# Altium footprint library LTC5594IUHPBF.PcbLib: 3 footprints
Each footprint in its own frame and in the unit in brackets; x right, y up, seen from the top. Pads: shape width x height; smd on the part's side, far side on the other; paste and mask are expansions set on the pad; w line width, h text height; cw(c..) or ccw(c..) is an arc to the next point about the centre after c.
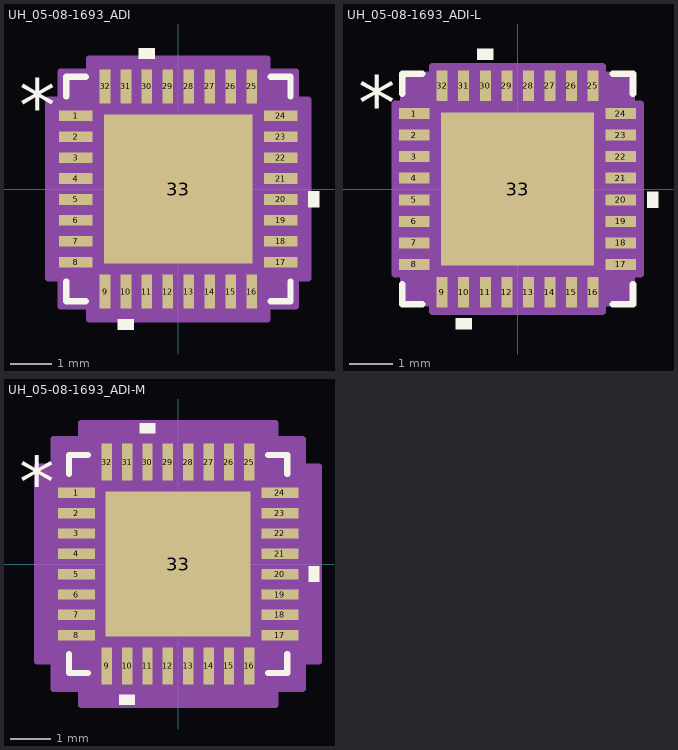
[diagram p0: the footprints below, top view; thin cyan lines are the x and y axes]

## UH_05-08-1693_ADI [mil]
pads (33):
  rect 31.81x10.03 smd paste+0 mask+0: 1(-96.41,68.92) 2(-96.41,49.23) 3(-96.41,29.54) 4(-96.41,9.85) 5(-96.41,-9.85) 6(-96.41,-29.54) 7(-96.41,-49.23) 8(-96.41,-68.92) 17(96.41,-68.92) 18(96.41,-49.23) 19(96.41,-29.54) 20(96.41,-9.85) 21(96.41,9.85) 22(96.41,29.54) 23(96.41,49.23) 24(96.41,68.92)
  rect 10.03x31.81 smd paste+0 mask+0: 9(-68.92,-96.41) 10(-49.23,-96.41) 11(-29.54,-96.41) 12(-9.85,-96.41) 13(9.85,-96.41) 14(29.54,-96.41) 15(49.23,-96.41) 16(68.92,-96.41) 25(68.92,96.41) 26(49.23,96.41) 27(29.54,96.41) 28(9.85,96.41) 29(-9.85,96.41) 30(-29.54,96.41) 31(-49.23,96.41) 32(-68.92,96.41)
  rect 140x140 smd paste-70 mask+0: 33(0,0)
Top Overlay:
  region: -22.04,122.31 -37.03,122.31 -37.03,132.31 -22.04,132.31
  region: 122.31,-2.35 132.31,-2.35 132.31,-17.34 122.31,-17.34
  region: -41.73,-122.31 -56.73,-122.31 -56.73,-132.31 -41.73,-132.31
  lines w6: -105.5,-87.03 -105.5,-105.5 -87.03,-105.5 ; -105.5,87.03 -105.5,105.5 -87.03,105.5 ; 87.03,-105.5 105.5,-105.5 105.5,-87.03 ; 87.03,105.5 105.5,105.5 105.5,87.03
  text ".Designator" at -137.5,-25 h50
  text "*" at -149.81,53.76 h50
Top Paste:
  region: 66.06,-3.94 3.94,-3.94 3.94,-66.06 66.06,-66.06
  region: 66.06,66.06 3.94,66.06 3.94,3.94 66.06,3.94
  region: -3.94,-3.94 -66.06,-3.94 -66.06,-66.06 -3.94,-66.06
  region: -3.94,66.06 -66.06,66.06 -66.06,3.94 -3.94,3.94
Mechanical 13:
  lines w1: -100.5,50.5 -50.5,100.5 ; -100.5,-100.5 -100.5,100.5 100.5,100.5 100.5,-100.5 -100.5,-100.5 ; -100.5,-74.92 -100.5,-62.91 -100.5,-74.92 ; -100.5,-55.23 -100.5,-43.23 -100.5,-55.23 ; -100.5,-35.53 -100.5,-23.54 -100.5,-35.53 ; -100.5,-15.85 -100.5,-3.85 -100.5,-15.85 ; -100.5,3.85 -100.5,15.85 -100.5,3.85 ; -100.5,23.54 -100.5,35.53 -100.5,23.54 ; -100.5,43.23 -100.5,55.23 -100.5,43.23 ; -100.5,62.91 -100.5,74.92 -100.5,62.91 ; -74.92,-100.5 -62.91,-100.5 -74.92,-100.5 ; -74.92,100.5 -62.91,100.5 -74.92,100.5 ; -55.23,-100.5 -43.23,-100.5 -55.23,-100.5 ; -55.23,100.5 -43.23,100.5 -55.23,100.5 ; -35.53,-100.5 -23.54,-100.5 -35.53,-100.5 ; -35.53,100.5 -23.54,100.5 -35.53,100.5 ; -15.85,-100.5 -3.85,-100.5 -15.85,-100.5 ; -15.85,100.5 -3.85,100.5 -15.85,100.5 ; 3.85,-100.5 15.85,-100.5 3.85,-100.5 ; 3.85,100.5 15.85,100.5 3.85,100.5 ; 23.54,-100.5 35.53,-100.5 23.54,-100.5 ; 23.54,100.5 35.53,100.5 23.54,100.5 ; 43.23,-100.5 55.23,-100.5 43.23,-100.5 ; 43.23,100.5 55.23,100.5 43.23,100.5 ; 62.91,-100.5 74.92,-100.5 62.91,-100.5 ; 62.91,100.5 74.92,100.5 62.91,100.5 ; 100.5,-74.92 100.5,-62.91 100.5,-74.92 ; 100.5,-55.23 100.5,-43.23 100.5,-55.23 ; 100.5,-35.53 100.5,-23.54 100.5,-35.53 ; 100.5,-15.85 100.5,-3.85 100.5,-15.85 ; 100.5,3.85 100.5,15.85 100.5,3.85 ; 100.5,23.54 100.5,35.53 100.5,23.54 ; 100.5,43.23 100.5,55.23 100.5,43.23 ; 100.5,62.91 100.5,74.92 100.5,62.91
  text "*" at -93,53.76 h50
  text ".Designator" at -137.5,-25 h50
Mechanical 15:
  region: -83.93,-110.5 -110.5,-110.5 -110.5,-83.93 -122.31,-83.93 -122.31,83.93 -110.5,83.93 -110.5,110.5 -83.93,110.5 -83.93,122.31 83.93,122.31 83.93,110.5 110.5,110.5 110.5,83.93 122.31,83.93 122.31,-83.93 110.5,-83.93 110.5,-110.5 83.93,-110.5 83.93,-122.31 -83.93,-122.31
  lines w6: -122.31,-83.93 -122.31,83.93 -110.5,83.93 -110.5,110.5 -83.93,110.5 -83.93,122.31 83.93,122.31 83.93,110.5 110.5,110.5 110.5,83.93 122.31,83.93 122.31,-83.93 110.5,-83.93 110.5,-110.5 83.93,-110.5 83.93,-122.31 -83.93,-122.31 -83.93,-110.5 -110.5,-110.5 -110.5,-83.93 -122.31,-83.93
3D body "UH_05-08-1693_ADI.step": height 32.09, standoff 0, extent -100.51,-100.51 100.51,100.51

## UH_05-08-1693_ADI-L [mil]
pads (33):
  rect 27.87x10.03 smd paste+0 mask+0: 1(-94.44,68.92) 2(-94.44,49.23) 3(-94.44,29.54) 4(-94.44,9.85) 5(-94.44,-9.85) 6(-94.44,-29.54) 7(-94.44,-49.23) 8(-94.44,-68.92) 17(94.44,-68.92) 18(94.44,-49.23) 19(94.44,-29.54) 20(94.44,-9.85) 21(94.44,9.85) 22(94.44,29.54) 23(94.44,49.23) 24(94.44,68.92)
  rect 10.03x27.87 smd paste+0 mask+0: 9(-68.92,-94.44) 10(-49.23,-94.44) 11(-29.54,-94.44) 12(-9.85,-94.44) 13(9.85,-94.44) 14(29.54,-94.44) 15(49.23,-94.44) 16(68.92,-94.44) 25(68.92,94.44) 26(49.23,94.44) 27(29.54,94.44) 28(9.85,94.44) 29(-9.85,94.44) 30(-29.54,94.44) 31(-49.23,94.44) 32(-68.92,94.44)
  rect 140x140 smd paste-70 mask+0: 33(0,0)
Top Overlay:
  region: -22.04,118.37 -37.03,118.37 -37.03,128.37 -22.04,128.37
  region: 118.37,-2.35 128.37,-2.35 128.37,-17.34 118.37,-17.34
  region: -41.73,-118.37 -56.73,-118.37 -56.73,-128.37 -41.73,-128.37
  lines w6: -105.5,-87.03 -105.5,-105.5 -87.03,-105.5 ; -105.5,87.03 -105.5,105.5 -87.03,105.5 ; 87.03,-105.5 105.5,-105.5 105.5,-87.03 ; 87.03,105.5 105.5,105.5 105.5,87.03
  text ".Designator" at -137.5,-25 h50
  text "*" at -145.87,53.76 h50
Top Paste:
  region: 66.06,-3.94 3.94,-3.94 3.94,-66.06 66.06,-66.06
  region: 66.06,66.06 3.94,66.06 3.94,3.94 66.06,3.94
  region: -3.94,-3.94 -66.06,-3.94 -66.06,-66.06 -3.94,-66.06
  region: -3.94,66.06 -66.06,66.06 -66.06,3.94 -3.94,3.94
Mechanical 13:
  lines w1: -100.5,50.5 -50.5,100.5 ; -100.5,-100.5 -100.5,100.5 100.5,100.5 100.5,-100.5 -100.5,-100.5 ; -100.5,-74.92 -100.5,-62.91 -100.5,-74.92 ; -100.5,-55.23 -100.5,-43.23 -100.5,-55.23 ; -100.5,-35.53 -100.5,-23.54 -100.5,-35.53 ; -100.5,-15.85 -100.5,-3.85 -100.5,-15.85 ; -100.5,3.85 -100.5,15.85 -100.5,3.85 ; -100.5,23.54 -100.5,35.53 -100.5,23.54 ; -100.5,43.23 -100.5,55.23 -100.5,43.23 ; -100.5,62.91 -100.5,74.92 -100.5,62.91 ; -74.92,-100.5 -62.91,-100.5 -74.92,-100.5 ; -74.92,100.5 -62.91,100.5 -74.92,100.5 ; -55.23,-100.5 -43.23,-100.5 -55.23,-100.5 ; -55.23,100.5 -43.23,100.5 -55.23,100.5 ; -35.53,-100.5 -23.54,-100.5 -35.53,-100.5 ; -35.53,100.5 -23.54,100.5 -35.53,100.5 ; -15.85,-100.5 -3.85,-100.5 -15.85,-100.5 ; -15.85,100.5 -3.85,100.5 -15.85,100.5 ; 3.85,-100.5 15.85,-100.5 3.85,-100.5 ; 3.85,100.5 15.85,100.5 3.85,100.5 ; 23.54,-100.5 35.53,-100.5 23.54,-100.5 ; 23.54,100.5 35.53,100.5 23.54,100.5 ; 43.23,-100.5 55.23,-100.5 43.23,-100.5 ; 43.23,100.5 55.23,100.5 43.23,100.5 ; 62.91,-100.5 74.92,-100.5 62.91,-100.5 ; 62.91,100.5 74.92,100.5 62.91,100.5 ; 100.5,-74.92 100.5,-62.91 100.5,-74.92 ; 100.5,-55.23 100.5,-43.23 100.5,-55.23 ; 100.5,-35.53 100.5,-23.54 100.5,-35.53 ; 100.5,-15.85 100.5,-3.85 100.5,-15.85 ; 100.5,3.85 100.5,15.85 100.5,3.85 ; 100.5,23.54 100.5,35.53 100.5,23.54 ; 100.5,43.23 100.5,55.23 100.5,43.23 ; 100.5,62.91 100.5,74.92 100.5,62.91
  text "*" at -93,53.76 h50
  text ".Designator" at -137.5,-25 h50
Mechanical 15:
  region: -77.93,-104.5 -104.5,-104.5 -104.5,-77.93 -112.37,-77.93 -112.37,77.93 -104.5,77.93 -104.5,104.5 -77.93,104.5 -77.93,112.37 77.93,112.37 77.93,104.5 104.5,104.5 104.5,77.93 112.37,77.93 112.37,-77.93 104.5,-77.93 104.5,-104.5 77.93,-104.5 77.93,-112.37 -77.93,-112.37
  lines w6: -112.37,-77.93 -112.37,77.93 -104.5,77.93 -104.5,104.5 -77.93,104.5 -77.93,112.37 77.93,112.37 77.93,104.5 104.5,104.5 104.5,77.93 112.37,77.93 112.37,-77.93 104.5,-77.93 104.5,-104.5 77.93,-104.5 77.93,-112.37 -77.93,-112.37 -77.93,-104.5 -104.5,-104.5 -104.5,-77.93 -112.37,-77.93
3D body "UH_05-08-1693_ADI.step": height 32.09, standoff 0, extent -100.51,-100.51 100.51,100.51

## UH_05-08-1693_ADI-M [mil]
pads (33):
  rect 35.75x10.03 smd paste+0 mask+0: 1(-98.37,68.92) 2(-98.37,49.23) 3(-98.37,29.54) 4(-98.37,9.85) 5(-98.37,-9.85) 6(-98.37,-29.54) 7(-98.37,-49.23) 8(-98.37,-68.92) 17(98.37,-68.92) 18(98.37,-49.23) 19(98.37,-29.54) 20(98.37,-9.85) 21(98.37,9.85) 22(98.37,29.54) 23(98.37,49.23) 24(98.37,68.92)
  rect 10.03x35.75 smd paste+0 mask+0: 9(-68.92,-98.37) 10(-49.23,-98.37) 11(-29.54,-98.37) 12(-9.85,-98.37) 13(9.85,-98.37) 14(29.54,-98.37) 15(49.23,-98.37) 16(68.92,-98.37) 25(68.92,98.37) 26(49.23,98.37) 27(29.54,98.37) 28(9.85,98.37) 29(-9.85,98.37) 30(-29.54,98.37) 31(-49.23,98.37) 32(-68.92,98.37)
  rect 140x140 smd paste-70 mask+0: 33(0,0)
Top Overlay:
  region: -41.73,-126.25 -56.73,-126.25 -56.73,-136.25 -41.73,-136.25
  region: 126.25,-2.35 136.25,-2.35 136.25,-17.34 126.25,-17.34
  region: -22.04,126.25 -37.03,126.25 -37.03,136.25 -22.04,136.25
  lines w6: -105.5,-87.03 -105.5,-105.5 -87.03,-105.5 ; -105.5,87.03 -105.5,105.5 -87.03,105.5 ; 87.03,-105.5 105.5,-105.5 105.5,-87.03 ; 87.03,105.5 105.5,105.5 105.5,87.03
  text "*" at -153.75,53.76 h50
  text ".Designator" at -137.5,-25 h50
Top Paste:
  region: -3.94,66.06 -66.06,66.06 -66.06,3.94 -3.94,3.94
  region: -3.94,-3.94 -66.06,-3.94 -66.06,-66.06 -3.94,-66.06
  region: 66.06,66.06 3.94,66.06 3.94,3.94 66.06,3.94
  region: 66.06,-3.94 3.94,-3.94 3.94,-66.06 66.06,-66.06
Mechanical 13:
  lines w1: -100.5,50.5 -50.5,100.5 ; -100.5,-100.5 100.5,-100.5 100.5,100.5 -100.5,100.5 -100.5,-100.5 ; -100.5,-74.92 -100.5,-62.91 -100.5,-74.92 ; -100.5,-55.23 -100.5,-43.23 -100.5,-55.23 ; -100.5,-35.53 -100.5,-23.54 -100.5,-35.53 ; -100.5,-15.85 -100.5,-3.85 -100.5,-15.85 ; -100.5,3.85 -100.5,15.85 -100.5,3.85 ; -100.5,23.54 -100.5,35.53 -100.5,23.54 ; -100.5,43.23 -100.5,55.23 -100.5,43.23 ; -100.5,62.91 -100.5,74.92 -100.5,62.91 ; -74.92,-100.5 -62.91,-100.5 -74.92,-100.5 ; -74.92,100.5 -62.91,100.5 -74.92,100.5 ; -55.23,-100.5 -43.23,-100.5 -55.23,-100.5 ; -55.23,100.5 -43.23,100.5 -55.23,100.5 ; -35.53,-100.5 -23.54,-100.5 -35.53,-100.5 ; -35.53,100.5 -23.54,100.5 -35.53,100.5 ; -15.85,-100.5 -3.85,-100.5 -15.85,-100.5 ; -15.85,100.5 -3.85,100.5 -15.85,100.5 ; 3.85,-100.5 15.85,-100.5 3.85,-100.5 ; 3.85,100.5 15.85,100.5 3.85,100.5 ; 23.54,-100.5 35.53,-100.5 23.54,-100.5 ; 23.54,100.5 35.53,100.5 23.54,100.5 ; 43.23,-100.5 55.23,-100.5 43.23,-100.5 ; 43.23,100.5 55.23,100.5 43.23,100.5 ; 62.91,-100.5 74.92,-100.5 62.91,-100.5 ; 62.91,100.5 74.92,100.5 62.91,100.5 ; 100.5,-74.92 100.5,-62.91 100.5,-74.92 ; 100.5,-55.23 100.5,-43.23 100.5,-55.23 ; 100.5,-35.53 100.5,-23.54 100.5,-35.53 ; 100.5,-15.85 100.5,-3.85 100.5,-15.85 ; 100.5,3.85 100.5,15.85 100.5,3.85 ; 100.5,23.54 100.5,35.53 100.5,23.54 ; 100.5,43.23 100.5,55.23 100.5,43.23 ; 100.5,62.91 100.5,74.92 100.5,62.91
  text ".Designator" at -137.5,-25 h50
  text "*" at -93,53.76 h50
Mechanical 15:
  region: -93.93,-120.5 -120.5,-120.5 -120.5,-93.93 -136.25,-93.93 -136.25,93.93 -120.5,93.93 -120.5,120.5 -93.93,120.5 -93.93,136.25 93.93,136.25 93.93,120.5 120.5,120.5 120.5,93.93 136.25,93.93 136.25,-93.93 120.5,-93.93 120.5,-120.5 93.93,-120.5 93.93,-136.25 -93.93,-136.25
  lines w6: -136.25,-93.93 -120.5,-93.93 -120.5,-120.5 -93.93,-120.5 -93.93,-136.25 93.93,-136.25 93.93,-120.5 120.5,-120.5 120.5,-93.93 136.25,-93.93 136.25,93.93 120.5,93.93 120.5,120.5 93.93,120.5 93.93,136.25 -93.93,136.25 -93.93,120.5 -120.5,120.5 -120.5,93.93 -136.25,93.93 -136.25,-93.93
3D body "UH_05-08-1693_ADI.step": height 32.09, standoff 0, extent -100.51,-100.51 100.51,100.51